# Altium schematic symbol library STM32MP255DAL3.SchLib: 1 symbol
Pins are listed as number, name and electrical type; pins without a type are passive.

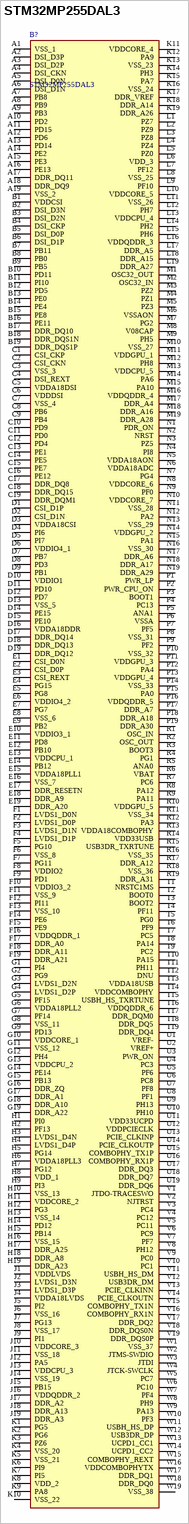
[diagram p0: symbol STM32MP255DAL3]

## STM32MP255DAL3
designator B?
Arm based dual Cortex-A35 1.5 GHz + Cortex-M33 MPU with AI, 3D GPU, videoencoder/decoder, TFT/DSI/LVDS, USB 3.0, PCIe; Manufacturer_Name: STMicroelectronics; Geometry.Height: 1.155mm; Manufacturer_Part_Number: STM32MP255DAL3; Mouser Part Number: *; Mouser Price/Stock: *; Arrow Part Number: STM32MP255DAL3; Arrow Price/Stock: https://www.arrow.com/en/products/stm32mp255dal3/stmicroelectronics?utm_currency=USD&region=nac; Datasheet Link: https://www.st.com/resource/en/datasheet/stm32mp251a.pdf
footprint BGA361C50P19X19_1000X1000X116
pins: A1 VSS_1, A2 DSI_D3P, A3 DSI_D2P, A4 DSI_CKN, A5 DSI_D0N, A6 DSI_D1N, A7 PB8, A8 PB9, A9 PB3, A10 PD2, A11 PD15, A12 PD6, A13 PD14, A14 PE2, A15 PE3, A16 PE13, A17 DDR_DQ11, A18 DDR_DQ9, A19 VSS_2, B1 VDDCSI, B2 DSI_D3N, B3 DSI_D2N, B4 DSI_CKP, B5 DSI_D0P, B6 DSI_D1P, B7 PB11, B8 PB0, B9 PB5, B10 PD11, B11 PI10, B12 PD5, B13 PE0, B14 PE4, B15 PE8, B16 PE11, B17 DDR_DQ10, B18 DDR_DQS1N, B19 DDR_DQS1P, C1 CSI_CKP, C2 CSI_CKN, C3 VSS_3, C4 DSI_REXT, C5 VDDA18DSI, C6 VDDDSI, C7 VSS_4, C8 PB6, C9 PB4, C10 PD9, C11 PD0, C12 PD4, C13 PE1, C14 PE5, C15 PE7, C16 PE12, C17 DDR_DQ8, C18 DDR_DQ15, C19 DDR_DQM1, D1 CSI_D1P, D2 CSI_D1N, D3 VDDA18CSI, D4 PI6, D5 PI7, D6 VDDIO4_1, D7 PB7, D8 PD3, D9 PB1, D10 VDDIO1, D11 PD10, D12 PD7, D13 VSS_5, D14 PE15, D15 PE10, D16 VDDA18DDR, D17 DDR_DQ14, D18 DDR_DQ13, D19 DDR_DQ12, E1 CSI_D0N, E2 CSI_D0P, E3 CSI_REXT, E4 PG15, E5 PG8, E6 VDDIO4_2, E7 PG7, E8 VSS_6, E9 PB2, E10 VDDIO3_1, E11 PD8, E12 PB10, E13 VDDCPU_1, E14 PB12, E15 VDDA18PLL1, E16 VSS_7, E17 DDR_RESETN, E18 DDR_A9, E19 DDR_A20, F1 LVDS1_D0N, F2 LVDS1_D0P, F3 LVDS1_D1N, F4 LVDS1_D1P, F5 PG10, F6 VSS_8, F7 PG11, F8 VDDIO2, F9 PD1, F10 VDDIO3_2, F11 VSS_9, F12 PI11, F13 VSS_10, F14 PE6, F15 PE9, F16 VDDQDDR_1, F17 DDR_A0, F18 DDR_A11, F19 DDR_A21, G1 PI4, G2 PG9, G3 LVDS1_D2N, G4 LVDS1_D2P, G5 PF15, G6 VDDA18PLL2, G7 PF14, G8 VSS_11, G9 PD13, G10 VDDCORE_1, G11 VSS_12, G12 PH4, G13 VDDCPU_2, G14 PE14, G15 PB13, G16 DDR_ZQ, G17 DDR_A1, G18 DDR_A10, G19 DDR_A22, H1 PI0, H2 PF13, H3 LVDS1_D4N, H4 LVDS1_D4P, H5 PG14, H6 VDDA18PLL3, H7 PG12, H8 VDD_1, H9 PI3, H10 VSS_13, H11 VDDCORE_2, H12 PG3, H13 VSS_14, H14 PD12, H15 PB14, H16 VSS_15, H17 DDR_A25, H18 DDR_A8, H19 DDR_A23, J1 VDDLVDS, J2 LVDS1_D3N, J3 LVDS1_D3P, J4 VDDA18LVDS, J5 PI2, J6 VSS_16, J7 PG13, J8 VSS_17, J9 PI1, J10 VDDCORE_3, J11 VSS_18, J12 PA5, J13 VDDCPU_3, J14 VSS_19, J15 PB15, J16 VDDQDDR_2, J17 DDR_A2, J18 DDR_A13, J19 DDR_A3, K1 PG5, K2 PG6, K3 PZ6, K4 VSS_20, K5 VSS_21, K6 PI9, K7 PI5, K8 VDD_2, K9 PA8, K10 VSS_22, K11 VDDCORE_4, K12 PA9, K13 VSS_23, K14 PH3, K15 PA7, K16 VSS_24, K17 DDR_VREF, K18 DDR_A14, K19 DDR_A26, L1 PZ7, L2 PZ9, L3 PZ8, L4 PZ4, L5 PZ0, L6 VDD_3, L7 PF12, L8 VSS_25, L9 PF10, L10 VDDCORE_5, L11 VSS_26, L12 PH7, L13 VDDCPU_4, L14 PH2, L15 PH6, L16 VDDQDDR_3, L17 DDR_A5, L18 DDR_A15, L19 DDR_A27, M1 OSC32_OUT, M2 OSC32_IN, M3 PZ2, M4 PZ1, M5 PZ3, M6 VSSAON, M7 PG2, M8 V08CAP, M9 PH5, M10 VSS_27, M11 VDDGPU_1, M12 PH8, M13 VDDCPU_5, M14 PA6, M15 PA10, M16 VDDQDDR_4, M17 DDR_A4, M18 DDR_A16, M19 DDR_A28, N1 PDR_ON, N2 NRST, N3 PZ5, N4 PI8, N5 VDDA18AON, N6 VDDA18ADC, N7 PG4, N8 VDDCORE_6, N9 PF0, N10 VDDCORE_7, N11 VSS_28, N12 PA2, N13 VSS_29, N14 VDDGPU_2, N15 PA1, N16 VSS_30, N17 DDR_A6, N18 DDR_A17, N19 DDR_A29, P1 PWR_LP, P2 PWR_CPU_ON, P3 BOOT1, P4 PC13, P5 ANA1, P6 VSSA, P7 PF5, P8 VSS_31, P9 PF2, P10 VSS_32, P11 VDDGPU_3, P12 PA4, P13 VDDGPU_4, P14 VSS_33, P15 PA0, P16 VDDQDDR_5, P17 DDR_A7, P18 DDR_A18, P19 DDR_A30, R1 OSC_IN, R2 OSC_OUT, R3 BOOT3, R4 PG1, R5 ANA0, R6 VBAT, R7 PC6, R8 PA12, R9 PA11, R10 VDDGPU_5, R11 VSS_34, R12 PA3, R13 VDDA18COMBOPHY, R14 VDD33USB, R15 USB3DR_TXRTUNE, R16 VSS_35, R17 DDR_A12, R18 VSS_36, R19 DDR_A31, T1 NRSTC1MS, T2 BOOT0, T3 BOOT2, T4 PF11, T5 PG0, T6 PF9, T7 PC5, T8 PA14, T9 PC2, T10 PA15, T11 PH11, T12 DNU, T13 VDDA18USB, T14 VDDCOMBOPHY, T15 USBH_HS_TXRTUNE, T16 VDDQDDR_6, T17 DDR_DQM0, T18 DDR_DQ5, T19 DDR_DQ4, U1 VREF-, U2 VREF+, U3 PWR_ON, U4 PC3, U5 PF6, U6 PC8, U7 PF8, U8 PF1, U9 PH13, U10 PH10, U11 VDD33UCPD, U12 VDDPCIECLK, U13 PCIE_CLKINP, U14 PCIE_CLKOUTP, U15 COMBOPHY_TX1P, U16 COMBOPHY_RX1P, U17 DDR_DQ3, U18 DDR_DQ7, U19 DDR_DQ6, V1 JTDO-TRACESWO, V2 NJTRST, V3 PC4, V4 PC12, V5 PC11, V6 PC9, V7 PF7, V8 PH12, V9 PC0, V10 PC1, V11 USBH_HS_DM, V12 USB3DR_DM, V13 PCIE_CLKINN, V14 PCIE_CLKOUTN, V15 COMBOPHY_TX1N, V16 COMBOPHY_RX1N, V17 DDR_DQ2, V18 DDR_DQS0N, V19 DDR_DQS0P, W1 VSS_37, W2 JTMS-SWDIO, W3 JTDI, W4 JTCK-SWCLK, W5 PC7, W6 PC10, W7 PF4, W8 PH9, W9 PA13, W10 PF3, W11 USBH_HS_DP, W12 USB3DR_DP, W13 UCPD1_CC1, W14 UCPD1_CC2, W15 COMBOPHY_REXT, W16 VDDCOMBOPHYTX, W17 DDR_DQ1, W18 DDR_DQ0, W19 VSS_38